# Altium schematic symbol library PBC02DAAN.SchLib: 1 symbol
Pins are listed as number, name and electrical type; pins without a type are passive.

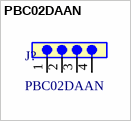
[diagram p0: symbol PBC02DAAN]

## PBC02DAAN
designator J?
Connector Header Through Hole 4 position 0.100" (2.54mm); Manufacturer_Name: Sullins; Copyright: Copyright (C) 2026 Ultra Librarian. All rights reserved.; Manufacturer_Part_Number: PBC02DAAN; RefDes: RefDes; Type: Type
footprint CONN4_DAAN_SUL
pins: 1, 2, 3, 4